# Altium footprint library Package_DFN_QFN.PcbLib: 735 footprints (part 16 of 46)
Each footprint in its own frame and in the unit in brackets; x right, y up, seen from the top. Pads: shape width x height; smd on the part's side, far side on the other; paste and mask are expansions set on the pad; w line width, h text height; cw(c..) or ccw(c..) is an arc to the next point about the centre after c.
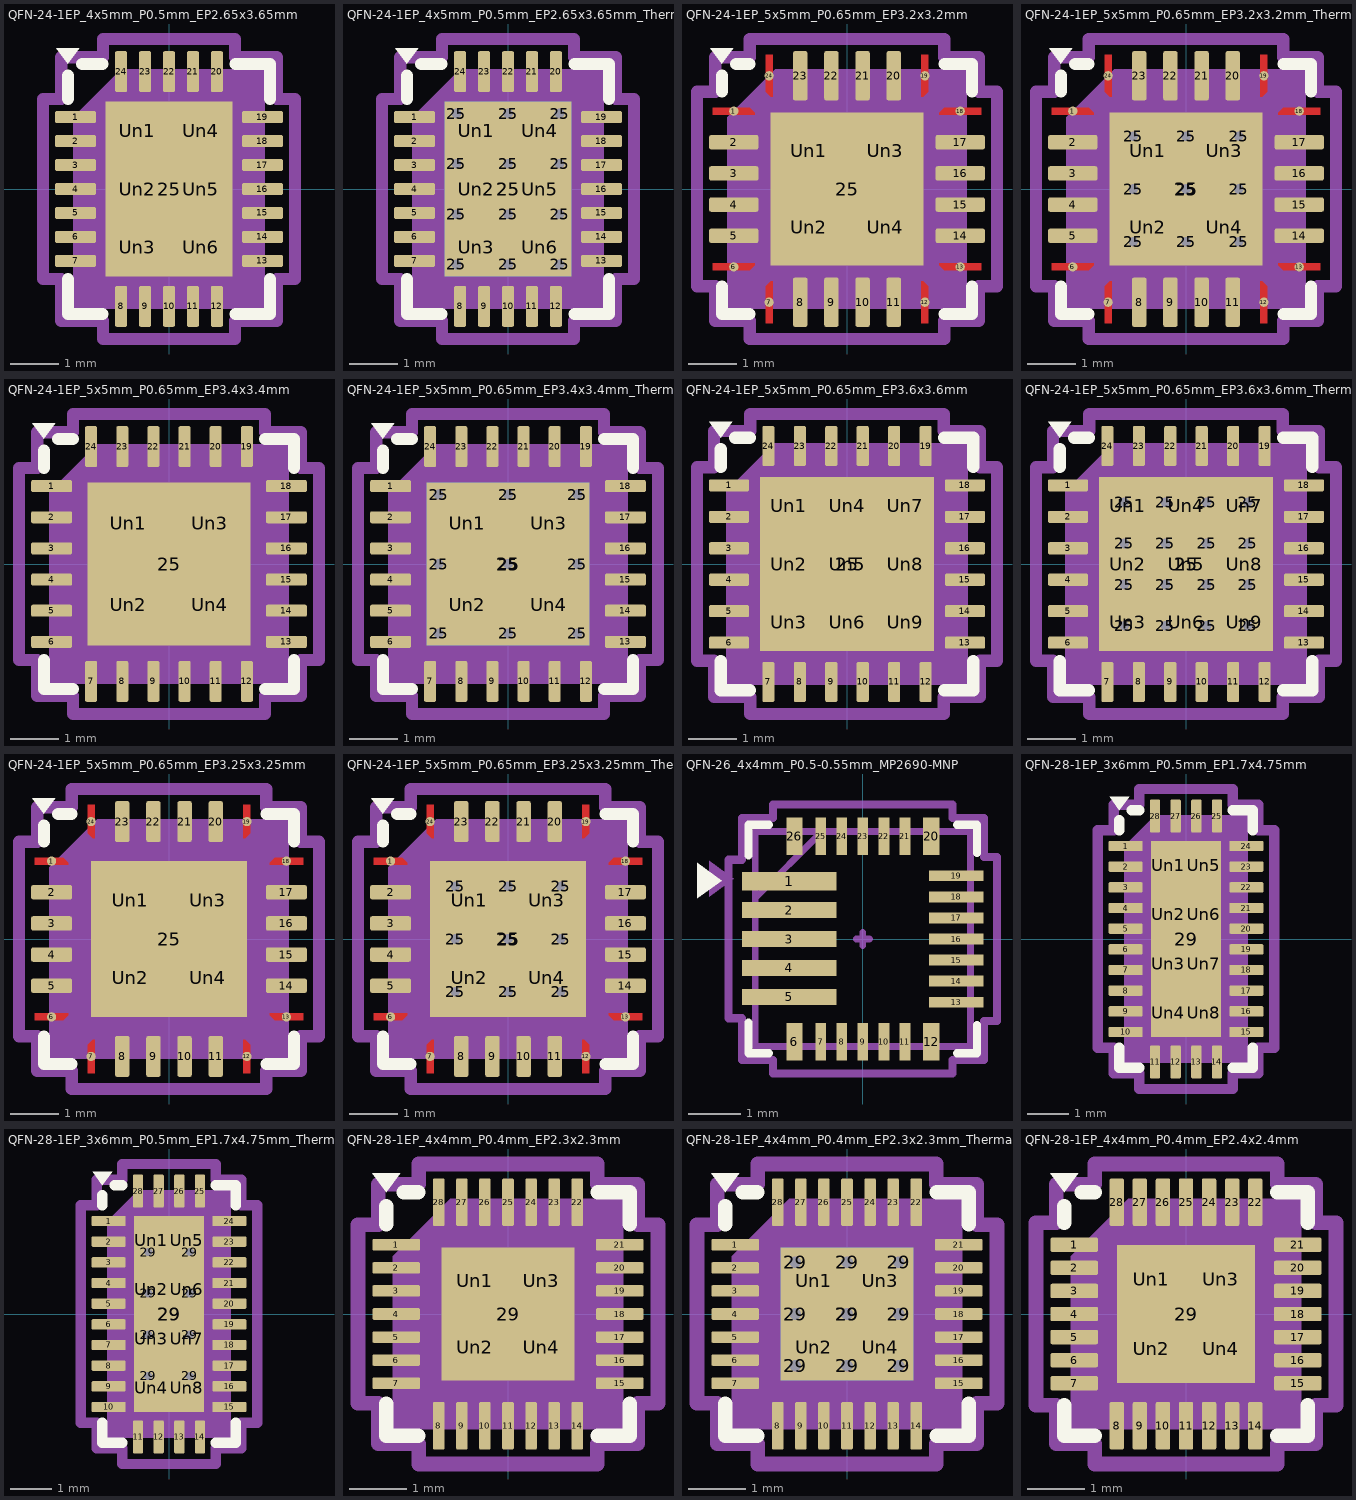
[diagram p15: the footprints below, top view; thin cyan lines are the x and y axes]

## QFN-24-1EP_4x5mm_P0.5mm_EP2.65x3.65mm [mm] "QFN-24-1EP_4x5mm_P0.5mm_EP2.65x3.65mm"
pads (31):
  rrect25% 0.85x0.25 smd: 1(-1.95,1.5) 2(-1.95,1) 3(-1.95,0.5) 4(-1.95,0) 5(-1.95,-0.5) 6(-1.95,-1) 7(-1.95,-1.5) 13(1.95,-1.5) 14(1.95,-1) 15(1.95,-0.5) 16(1.95,0) 17(1.95,0.5) 18(1.95,1) 19(1.95,1.5)
  rrect25% 0.25x0.85 smd: 8(-1,-2.45) 9(-0.5,-2.45) 10(0,-2.45) 11(0.5,-2.45) 12(1,-2.45) 20(1,2.45) 21(0.5,2.45) 22(0,2.45) 23(-0.5,2.45) 24(-1,2.45)
  rect 2.65x3.65 smd: 25(0,0)
  rrect25% 1.07x0.98 on Top Paste: Un1(-0.66,1.22) Un2(-0.66,0) Un3(-0.66,-1.22) Un4(0.66,1.22) Un5(0.66,0) Un6(0.66,-1.22)
F.SilkS:
  region: -2.11,2.61 -2.35,2.94 -1.87,2.94
  lines w0.254: -2.11,-1.885 -2.11,-2.61 -1.385,-2.61 ; -2.11,1.885 -2.11,2.37 ; -1.81,2.61 -1.385,2.61 ; 1.385,-2.61 2.11,-2.61 2.11,-1.885 ; 1.385,2.61 2.11,2.61 2.11,1.885
Top Component Center:
  lines w0.127: -0.127,0 0.127,0 -0.127,0 ; 0,-0.127 0,0.127 0,-0.127
Top Assembly:
  region: 2,-2.5 -2,-2.5 -2,1.5 -1,2.5 2,2.5
Top Courtyard:
  lines w0.254: -2.63,-1.88 -2.25,-1.88 -2.25,-2.75 -1.38,-2.75 -1.38,-3.13 1.38,-3.13 1.38,-2.75 2.25,-2.75 2.25,-1.88 2.63,-1.88 2.63,1.88 2.25,1.88 2.25,2.75 1.38,2.75 1.38,3.13 -1.38,3.13 -1.38,2.75 -2.25,2.75 -2.25,1.88 -2.63,1.88 -2.63,-1.88
Top Designator:
  text ".Designator" at -3.43,-0.344 h1.52
3D body "QFN-24-1EP_4x5mm_P0.5mm_EP2.65x3.65mm.step": height 0.77, standoff 0, extent -2,-2.5 2,2.5

## QFN-24-1EP_4x5mm_P0.5mm_EP2.65x3.65mm_ThermalVias [mm] "QFN-24-1EP_4x5mm_P0.5mm_EP2.65x3.65mm_ThermalVias"
pads (44):
  rrect25% 0.85x0.25 smd: 1(-1.95,1.5) 2(-1.95,1) 3(-1.95,0.5) 4(-1.95,0) 5(-1.95,-0.5) 6(-1.95,-1) 7(-1.95,-1.5) 13(1.95,-1.5) 14(1.95,-1) 15(1.95,-0.5) 16(1.95,0) 17(1.95,0.5) 18(1.95,1) 19(1.95,1.5)
  rrect25% 0.25x0.85 smd: 8(-1,-2.45) 9(-0.5,-2.45) 10(0,-2.45) 11(0.5,-2.45) 12(1,-2.45) 20(1,2.45) 21(0.5,2.45) 22(0,2.45) 23(-0.5,2.45) 24(-1,2.45)
  round 0.5 hole 0.2: 25(-1.075,-1.575) 25(-1.075,-0.525) 25(-1.075,0.525) 25(-1.075,1.575) 25(0,-1.575) 25(0,-0.525) 25(0,0.525) 25(0,1.575) 25(1.075,-1.575) 25(1.075,-0.525) 25(1.075,0.525) 25(1.075,1.575)
  rect 2.65x3.65 smd: 25(0,0)
  rect 2.65x3.65 smd far side: 25(0,0)
  rrect24% 1.15x1.05 on Top Paste: Un1(-0.66,1.22) Un2(-0.66,0) Un3(-0.66,-1.22) Un4(0.66,1.22) Un5(0.66,0) Un6(0.66,-1.22)
F.SilkS:
  region: -2.11,2.61 -2.35,2.94 -1.87,2.94
  lines w0.254: -2.11,-1.885 -2.11,-2.61 -1.385,-2.61 ; -2.11,1.885 -2.11,2.37 ; -1.81,2.61 -1.385,2.61 ; 1.385,-2.61 2.11,-2.61 2.11,-1.885 ; 1.385,2.61 2.11,2.61 2.11,1.885
Top Component Center:
  lines w0.127: -0.127,0 0.127,0 -0.127,0 ; 0,-0.127 0,0.127 0,-0.127
Top Assembly:
  region: 2,-2.5 -2,-2.5 -2,1.5 -1,2.5 2,2.5
Top Courtyard:
  lines w0.254: -2.63,-1.88 -2.25,-1.88 -2.25,-2.75 -1.38,-2.75 -1.38,-3.13 1.38,-3.13 1.38,-2.75 2.25,-2.75 2.25,-1.88 2.63,-1.88 2.63,1.88 2.25,1.88 2.25,2.75 1.38,2.75 1.38,3.13 -1.38,3.13 -1.38,2.75 -2.25,2.75 -2.25,1.88 -2.63,1.88 -2.63,-1.88
Top Designator:
  text ".Designator" at -3.43,-0.344 h1.52
3D body "QFN-24-1EP_4x5mm_P0.5mm_EP2.65x3.65mm.step": height 0.77, standoff 0, extent -2,-2.5 2,2.5

## QFN-24-1EP_5x5mm_P0.65mm_EP3.2x3.2mm [mm] "QFN-24-1EP_5x5mm_P0.65mm_EP3.2x3.2mm"
pads (29):
  round 0.194 smd: 1(-2.362,1.625) 6(-2.362,-1.625) 7(-1.625,-2.362) 12(1.625,-2.362) 13(2.362,-1.625) 18(2.362,1.625) 19(1.625,2.362) 24(-1.625,2.362)
  rrect25% 1.025x0.3 smd: 2(-2.362,0.975) 3(-2.362,0.325) 4(-2.362,-0.325) 5(-2.362,-0.975) 14(2.362,-0.975) 15(2.362,-0.325) 16(2.362,0.325) 17(2.362,0.975)
  rrect25% 0.3x1.025 smd: 8(-0.975,-2.362) 9(-0.325,-2.362) 10(0.325,-2.362) 11(0.975,-2.362) 20(0.975,2.362) 21(0.325,2.362) 22(-0.325,2.362) 23(-0.975,2.362)
  rect 3.2x3.2 smd: 25(0,0)
  rrect19% 1.29x1.29 on Top Paste: Un1(-0.8,0.8) Un2(-0.8,-0.8) Un3(0.8,0.8) Un4(0.8,-0.8)
F.Cu:
  region: -1.55,1.925 -1.594,1.925 -1.7,2.031 -1.7,2.8 -1.55,2.8
  region: 1.7,2.031 1.594,1.925 1.55,1.925 1.55,2.8 1.7,2.8
  region: 2.8,1.55 1.925,1.55 1.925,1.594 2.031,1.7 2.8,1.7
  region: 2.8,-1.7 2.031,-1.7 1.925,-1.594 1.925,-1.55 2.8,-1.55
  region: 1.7,-2.031 1.7,-2.8 1.55,-2.8 1.55,-1.925 1.594,-1.925
  region: -1.55,-2.8 -1.7,-2.8 -1.7,-2.031 -1.594,-1.925 -1.55,-1.925
  region: -1.925,-1.594 -2.031,-1.7 -2.8,-1.7 -2.8,-1.55 -1.925,-1.55
  region: -1.925,1.594 -1.925,1.55 -2.8,1.55 -2.8,1.7 -2.031,1.7
F.SilkS:
  region: -2.61,2.61 -2.85,2.94 -2.37,2.94
  lines w0.254: -2.61,-2.035 -2.61,-2.61 -2.035,-2.61 ; -2.61,2.035 -2.61,2.37 ; -2.31,2.61 -2.035,2.61 ; 2.035,-2.61 2.61,-2.61 2.61,-2.035 ; 2.035,2.61 2.61,2.61 2.61,2.035
F.Paste:
  region: -1.55,1.925 -1.594,1.925 -1.7,2.031 -1.7,2.8 -1.55,2.8
  region: 1.7,2.031 1.594,1.925 1.55,1.925 1.55,2.8 1.7,2.8
  region: 2.8,1.55 1.925,1.55 1.925,1.594 2.031,1.7 2.8,1.7
  region: 2.8,-1.7 2.031,-1.7 1.925,-1.594 1.925,-1.55 2.8,-1.55
  region: 1.7,-2.031 1.7,-2.8 1.55,-2.8 1.55,-1.925 1.594,-1.925
  region: -1.55,-2.8 -1.7,-2.8 -1.7,-2.031 -1.594,-1.925 -1.55,-1.925
  region: -1.925,-1.594 -2.031,-1.7 -2.8,-1.7 -2.8,-1.55 -1.925,-1.55
  region: -1.925,1.594 -1.925,1.55 -2.8,1.55 -2.8,1.7 -2.031,1.7
F.Mask:
  region: -1.55,1.925 -1.594,1.925 -1.7,2.031 -1.7,2.8 -1.55,2.8
  region: 1.7,2.031 1.594,1.925 1.55,1.925 1.55,2.8 1.7,2.8
  region: 2.8,1.55 1.925,1.55 1.925,1.594 2.031,1.7 2.8,1.7
  region: 2.8,-1.7 2.031,-1.7 1.925,-1.594 1.925,-1.55 2.8,-1.55
  region: 1.7,-2.031 1.7,-2.8 1.55,-2.8 1.55,-1.925 1.594,-1.925
  region: -1.55,-2.8 -1.7,-2.8 -1.7,-2.031 -1.594,-1.925 -1.55,-1.925
  region: -1.925,-1.594 -2.031,-1.7 -2.8,-1.7 -2.8,-1.55 -1.925,-1.55
  region: -1.925,1.594 -1.925,1.55 -2.8,1.55 -2.8,1.7 -2.031,1.7
Top Component Center:
  lines w0.127: -0.127,0 0.127,0 -0.127,0 ; 0,-0.127 0,0.127 0,-0.127
Top Assembly:
  region: 2.5,-2.5 -2.5,-2.5 -2.5,1.5 -1.5,2.5 2.5,2.5
Top Courtyard:
  lines w0.254: -3.13,-2.03 -2.75,-2.03 -2.75,-2.75 -2.03,-2.75 -2.03,-3.13 2.03,-3.13 2.03,-2.75 2.75,-2.75 2.75,-2.03 3.13,-2.03 3.13,2.03 2.75,2.03 2.75,2.75 2.03,2.75 2.03,3.13 -2.03,3.13 -2.03,2.75 -2.75,2.75 -2.75,2.03 -3.13,2.03 -3.13,-2.03
Top Designator:
  text ".Designator" at -3.43,-0.344 h1.52
3D body "QFN-24-1EP_5x5mm_P0.65mm_EP3.2x3.2mm.step": height 0.77, standoff 0, extent -2.5,-2.5 2.5,2.5

## QFN-24-1EP_5x5mm_P0.65mm_EP3.2x3.2mm_ThermalVias [mm] "QFN-24-1EP_5x5mm_P0.65mm_EP3.2x3.2mm_ThermalVias"
pads (39):
  round 0.194 smd: 1(-2.362,1.625) 6(-2.362,-1.625) 7(-1.625,-2.362) 12(1.625,-2.362) 13(2.362,-1.625) 18(2.362,1.625) 19(1.625,2.362) 24(-1.625,2.362)
  rrect25% 1.025x0.3 smd: 2(-2.362,0.975) 3(-2.362,0.325) 4(-2.362,-0.325) 5(-2.362,-0.975) 14(2.362,-0.975) 15(2.362,-0.325) 16(2.362,0.325) 17(2.362,0.975)
  rrect25% 0.3x1.025 smd: 8(-0.975,-2.362) 9(-0.325,-2.362) 10(0.325,-2.362) 11(0.975,-2.362) 20(0.975,2.362) 21(0.325,2.362) 22(-0.325,2.362) 23(-0.975,2.362)
  round 0.5 hole 0.2: 25(-1.1,-1.1) 25(-1.1,0) 25(-1.1,1.1) 25(0,-1.1) 25(0,0) 25(0,1.1) 25(1.1,-1.1) 25(1.1,0) 25(1.1,1.1)
  rect 3.2x3.2 smd: 25(0,0)
  rect 2.7x2.7 smd far side: 25(0,0)
  rrect19% 1.29x1.29 on Top Paste: Un1(-0.8,0.8) Un2(-0.8,-0.8) Un3(0.8,0.8) Un4(0.8,-0.8)
F.Cu:
  region: -1.55,1.925 -1.594,1.925 -1.7,2.031 -1.7,2.8 -1.55,2.8
  region: 1.7,2.031 1.594,1.925 1.55,1.925 1.55,2.8 1.7,2.8
  region: 2.8,1.55 1.925,1.55 1.925,1.594 2.031,1.7 2.8,1.7
  region: 2.8,-1.7 2.031,-1.7 1.925,-1.594 1.925,-1.55 2.8,-1.55
  region: 1.7,-2.031 1.7,-2.8 1.55,-2.8 1.55,-1.925 1.594,-1.925
  region: -1.55,-2.8 -1.7,-2.8 -1.7,-2.031 -1.594,-1.925 -1.55,-1.925
  region: -1.925,-1.594 -2.031,-1.7 -2.8,-1.7 -2.8,-1.55 -1.925,-1.55
  region: -1.925,1.594 -1.925,1.55 -2.8,1.55 -2.8,1.7 -2.031,1.7
F.SilkS:
  region: -2.61,2.61 -2.85,2.94 -2.37,2.94
  lines w0.254: -2.61,-2.035 -2.61,-2.61 -2.035,-2.61 ; -2.61,2.035 -2.61,2.37 ; -2.31,2.61 -2.035,2.61 ; 2.035,-2.61 2.61,-2.61 2.61,-2.035 ; 2.035,2.61 2.61,2.61 2.61,2.035
F.Paste:
  region: -1.55,1.925 -1.594,1.925 -1.7,2.031 -1.7,2.8 -1.55,2.8
  region: 1.7,2.031 1.594,1.925 1.55,1.925 1.55,2.8 1.7,2.8
  region: 2.8,1.55 1.925,1.55 1.925,1.594 2.031,1.7 2.8,1.7
  region: 2.8,-1.7 2.031,-1.7 1.925,-1.594 1.925,-1.55 2.8,-1.55
  region: 1.7,-2.031 1.7,-2.8 1.55,-2.8 1.55,-1.925 1.594,-1.925
  region: -1.55,-2.8 -1.7,-2.8 -1.7,-2.031 -1.594,-1.925 -1.55,-1.925
  region: -1.925,-1.594 -2.031,-1.7 -2.8,-1.7 -2.8,-1.55 -1.925,-1.55
  region: -1.925,1.594 -1.925,1.55 -2.8,1.55 -2.8,1.7 -2.031,1.7
F.Mask:
  region: -1.55,1.925 -1.594,1.925 -1.7,2.031 -1.7,2.8 -1.55,2.8
  region: 1.7,2.031 1.594,1.925 1.55,1.925 1.55,2.8 1.7,2.8
  region: 2.8,1.55 1.925,1.55 1.925,1.594 2.031,1.7 2.8,1.7
  region: 2.8,-1.7 2.031,-1.7 1.925,-1.594 1.925,-1.55 2.8,-1.55
  region: 1.7,-2.031 1.7,-2.8 1.55,-2.8 1.55,-1.925 1.594,-1.925
  region: -1.55,-2.8 -1.7,-2.8 -1.7,-2.031 -1.594,-1.925 -1.55,-1.925
  region: -1.925,-1.594 -2.031,-1.7 -2.8,-1.7 -2.8,-1.55 -1.925,-1.55
  region: -1.925,1.594 -1.925,1.55 -2.8,1.55 -2.8,1.7 -2.031,1.7
Top Component Center:
  lines w0.127: -0.127,0 0.127,0 -0.127,0 ; 0,-0.127 0,0.127 0,-0.127
Top Assembly:
  region: 2.5,-2.5 -2.5,-2.5 -2.5,1.5 -1.5,2.5 2.5,2.5
Top Courtyard:
  lines w0.254: -3.13,-2.03 -2.75,-2.03 -2.75,-2.75 -2.03,-2.75 -2.03,-3.13 2.03,-3.13 2.03,-2.75 2.75,-2.75 2.75,-2.03 3.13,-2.03 3.13,2.03 2.75,2.03 2.75,2.75 2.03,2.75 2.03,3.13 -2.03,3.13 -2.03,2.75 -2.75,2.75 -2.75,2.03 -3.13,2.03 -3.13,-2.03
Top Designator:
  text ".Designator" at -3.43,-0.344 h1.52
3D body "QFN-24-1EP_5x5mm_P0.65mm_EP3.2x3.2mm.step": height 0.77, standoff 0, extent -2.5,-2.5 2.5,2.5

## QFN-24-1EP_5x5mm_P0.65mm_EP3.4x3.4mm [mm] "QFN-24-1EP_5x5mm_P0.65mm_EP3.4x3.4mm"
pads (29):
  rrect25% 0.85x0.25 smd: 1(-2.45,1.625) 2(-2.45,0.975) 3(-2.45,0.325) 4(-2.45,-0.325) 5(-2.45,-0.975) 6(-2.45,-1.625) 13(2.45,-1.625) 14(2.45,-0.975) 15(2.45,-0.325) 16(2.45,0.325) 17(2.45,0.975) 18(2.45,1.625)
  rrect25% 0.25x0.85 smd: 7(-1.625,-2.45) 8(-0.975,-2.45) 9(-0.325,-2.45) 10(0.325,-2.45) 11(0.975,-2.45) 12(1.625,-2.45) 19(1.625,2.45) 20(0.975,2.45) 21(0.325,2.45) 22(-0.325,2.45) 23(-0.975,2.45) 24(-1.625,2.45)
  rect 3.4x3.4 smd: 25(0,0)
  rrect18% 1.37x1.37 on Top Paste: Un1(-0.85,0.85) Un2(-0.85,-0.85) Un3(0.85,0.85) Un4(0.85,-0.85)
F.SilkS:
  region: -2.61,2.61 -2.85,2.94 -2.37,2.94
  lines w0.254: -2.61,-2.01 -2.61,-2.61 -2.01,-2.61 ; -2.61,2.01 -2.61,2.37 ; -2.31,2.61 -2.01,2.61 ; 2.01,-2.61 2.61,-2.61 2.61,-2.01 ; 2.01,2.61 2.61,2.61 2.61,2.01
Top Component Center:
  lines w0.127: -0.127,0 0.127,0 -0.127,0 ; 0,-0.127 0,0.127 0,-0.127
Top Assembly:
  region: 2.5,-2.5 -2.5,-2.5 -2.5,1.5 -1.5,2.5 2.5,2.5
Top Courtyard:
  lines w0.254: -3.13,-2 -3.13,2 -2.75,2 -2.75,2.75 -2,2.75 -2,3.13 2,3.13 2,2.75 2.75,2.75 2.75,2 3.13,2 3.13,-2 2.75,-2 2.75,-2.75 2,-2.75 2,-3.13 -2,-3.13 -2,-2.75 -2.75,-2.75 -2.75,-2 -3.13,-2
Top Designator:
  text ".Designator" at -3.43,-0.344 h1.52
3D body "QFN-24-1EP_5x5mm_P0.65mm_EP3.2x3.2mm.step": height 0.77, standoff 0, extent -2.5,-2.5 2.5,2.5

## QFN-24-1EP_5x5mm_P0.65mm_EP3.4x3.4mm_ThermalVias [mm] "QFN-24-1EP_5x5mm_P0.65mm_EP3.4x3.4mm_ThermalVias"
pads (39):
  rrect25% 0.85x0.25 smd: 1(-2.45,1.625) 2(-2.45,0.975) 3(-2.45,0.325) 4(-2.45,-0.325) 5(-2.45,-0.975) 6(-2.45,-1.625) 13(2.45,-1.625) 14(2.45,-0.975) 15(2.45,-0.325) 16(2.45,0.325) 17(2.45,0.975) 18(2.45,1.625)
  rrect25% 0.25x0.85 smd: 7(-1.625,-2.45) 8(-0.975,-2.45) 9(-0.325,-2.45) 10(0.325,-2.45) 11(0.975,-2.45) 12(1.625,-2.45) 19(1.625,2.45) 20(0.975,2.45) 21(0.325,2.45) 22(-0.325,2.45) 23(-0.975,2.45) 24(-1.625,2.45)
  round 0.5 hole 0.2: 25(-1.45,-1.45) 25(-1.45,0) 25(-1.45,1.45) 25(0,-1.45) 25(0,0) 25(0,1.45) 25(1.45,-1.45) 25(1.45,0) 25(1.45,1.45)
  rect 3.4x3.4 smd: 25(0,0)
  rect 3.4x3.4 smd far side: 25(0,0)
  rrect17% 1.47x1.47 on Top Paste: Un1(-0.85,0.85) Un2(-0.85,-0.85) Un3(0.85,0.85) Un4(0.85,-0.85)
F.SilkS:
  region: -2.61,2.61 -2.85,2.94 -2.37,2.94
  lines w0.254: -2.61,-2.01 -2.61,-2.61 -2.01,-2.61 ; -2.61,2.01 -2.61,2.37 ; -2.31,2.61 -2.01,2.61 ; 2.01,-2.61 2.61,-2.61 2.61,-2.01 ; 2.01,2.61 2.61,2.61 2.61,2.01
Top Component Center:
  lines w0.127: -0.127,0 0.127,0 -0.127,0 ; 0,-0.127 0,0.127 0,-0.127
Top Assembly:
  region: 2.5,-2.5 -2.5,-2.5 -2.5,1.5 -1.5,2.5 2.5,2.5
Top Courtyard:
  lines w0.254: -3.13,-2 -2.75,-2 -2.75,-2.75 -2,-2.75 -2,-3.13 2,-3.13 2,-2.75 2.75,-2.75 2.75,-2 3.13,-2 3.13,2 2.75,2 2.75,2.75 2,2.75 2,3.13 -2,3.13 -2,2.75 -2.75,2.75 -2.75,2 -3.13,2 -3.13,-2
Top Designator:
  text ".Designator" at -3.43,-0.344 h1.52
3D body "QFN-24-1EP_5x5mm_P0.65mm_EP3.2x3.2mm.step": height 0.77, standoff 0, extent -2.5,-2.5 2.5,2.5

## QFN-24-1EP_5x5mm_P0.65mm_EP3.6x3.6mm [mm] "QFN-24-1EP_5x5mm_P0.65mm_EP3.6x3.6mm"
pads (34):
  rrect25% 0.825x0.25 smd: 1(-2.438,1.625) 2(-2.438,0.975) 3(-2.438,0.325) 4(-2.438,-0.325) 5(-2.438,-0.975) 6(-2.438,-1.625) 13(2.438,-1.625) 14(2.438,-0.975) 15(2.438,-0.325) 16(2.438,0.325) 17(2.438,0.975) 18(2.438,1.625)
  rrect25% 0.25x0.825 smd: 7(-1.625,-2.438) 8(-0.975,-2.438) 9(-0.325,-2.438) 10(0.325,-2.438) 11(0.975,-2.438) 12(1.625,-2.438) 19(1.625,2.438) 20(0.975,2.438) 21(0.325,2.438) 22(-0.325,2.438) 23(-0.975,2.438) 24(-1.625,2.438)
  rect 3.6x3.6 smd: 25(0,0)
  rrect25% 0.97x0.97 on Top Paste: Un1(-1.2,1.2) Un2(-1.2,0) Un3(-1.2,-1.2) Un4(0,1.2) Un5(0,0) Un6(0,-1.2) Un7(1.2,1.2) Un8(1.2,0) Un9(1.2,-1.2)
F.SilkS:
  region: -2.61,2.61 -2.85,2.94 -2.37,2.94
  lines w0.254: -2.61,-2.01 -2.61,-2.61 -2.01,-2.61 ; -2.61,2.01 -2.61,2.37 ; -2.31,2.61 -2.01,2.61 ; 2.01,-2.61 2.61,-2.61 2.61,-2.01 ; 2.01,2.61 2.61,2.61 2.61,2.01
Top Component Center:
  lines w0.127: -0.127,0 0.127,0 -0.127,0 ; 0,-0.127 0,0.127 0,-0.127
Top Assembly:
  region: 2.5,-2.5 -2.5,-2.5 -2.5,1.5 -1.5,2.5 2.5,2.5
Top Courtyard:
  lines w0.254: -3.1,-2 -2.75,-2 -2.75,-2.75 -2,-2.75 -2,-3.1 2,-3.1 2,-2.75 2.75,-2.75 2.75,-2 3.1,-2 3.1,2 2.75,2 2.75,2.75 2,2.75 2,3.1 -2,3.1 -2,2.75 -2.75,2.75 -2.75,2 -3.1,2 -3.1,-2
Top Designator:
  text ".Designator" at -3.43,-0.344 h1.52
3D body "QFN-24-1EP_5x5mm_P0.65mm_EP3.6x3.6mm.step": height 0.92, standoff 0, extent -2.5,-2.5 2.5,2.5

## QFN-24-1EP_5x5mm_P0.65mm_EP3.6x3.6mm_ThermalVias [mm] "QFN-24-1EP_5x5mm_P0.65mm_EP3.6x3.6mm_ThermalVias"
pads (51):
  rrect25% 0.825x0.25 smd: 1(-2.438,1.625) 2(-2.438,0.975) 3(-2.438,0.325) 4(-2.438,-0.325) 5(-2.438,-0.975) 6(-2.438,-1.625) 13(2.438,-1.625) 14(2.438,-0.975) 15(2.438,-0.325) 16(2.438,0.325) 17(2.438,0.975) 18(2.438,1.625)
  rrect25% 0.25x0.825 smd: 7(-1.625,-2.438) 8(-0.975,-2.438) 9(-0.325,-2.438) 10(0.325,-2.438) 11(0.975,-2.438) 12(1.625,-2.438) 19(1.625,2.438) 20(0.975,2.438) 21(0.325,2.438) 22(-0.325,2.438) 23(-0.975,2.438) 24(-1.625,2.438)
  round 0.5 hole 0.2: 25(-1.275,-1.275) 25(-1.275,-0.425) 25(-1.275,0.425) 25(-1.275,1.275) 25(-0.425,-1.275) 25(-0.425,-0.425) 25(-0.425,0.425) 25(-0.425,1.275) 25(0.425,-1.275) 25(0.425,-0.425) 25(0.425,0.425) 25(0.425,1.275) 25(1.275,-1.275) 25(1.275,-0.425) 25(1.275,0.425) 25(1.275,1.275)
  rect 3.6x3.6 smd: 25(0,0)
  rect 3.05x3.05 smd far side: 25(0,0)
  rrect25% 0.97x0.97 on Top Paste: Un1(-1.2,1.2) Un2(-1.2,0) Un3(-1.2,-1.2) Un4(0,1.2) Un5(0,0) Un6(0,-1.2) Un7(1.2,1.2) Un8(1.2,0) Un9(1.2,-1.2)
F.SilkS:
  region: -2.61,2.61 -2.85,2.94 -2.37,2.94
  lines w0.254: -2.61,-2.01 -2.61,-2.61 -2.01,-2.61 ; -2.61,2.01 -2.61,2.37 ; -2.31,2.61 -2.01,2.61 ; 2.01,-2.61 2.61,-2.61 2.61,-2.01 ; 2.01,2.61 2.61,2.61 2.61,2.01
Top Component Center:
  lines w0.127: -0.127,0 0.127,0 -0.127,0 ; 0,-0.127 0,0.127 0,-0.127
Top Assembly:
  region: 2.5,-2.5 -2.5,-2.5 -2.5,1.5 -1.5,2.5 2.5,2.5
Top Courtyard:
  lines w0.254: -3.1,-2 -2.75,-2 -2.75,-2.75 -2,-2.75 -2,-3.1 2,-3.1 2,-2.75 2.75,-2.75 2.75,-2 3.1,-2 3.1,2 2.75,2 2.75,2.75 2,2.75 2,3.1 -2,3.1 -2,2.75 -2.75,2.75 -2.75,2 -3.1,2 -3.1,-2
Top Designator:
  text ".Designator" at -3.43,-0.344 h1.52
3D body "QFN-24-1EP_5x5mm_P0.65mm_EP3.6x3.6mm.step": height 0.92, standoff 0, extent -2.5,-2.5 2.5,2.5

## QFN-24-1EP_5x5mm_P0.65mm_EP3.25x3.25mm [mm] "QFN-24-1EP_5x5mm_P0.65mm_EP3.25x3.25mm"
pads (29):
  round 0.194 smd: 1(-2.45,1.625) 6(-2.45,-1.625) 7(-1.625,-2.45) 12(1.625,-2.45) 13(2.45,-1.625) 18(2.45,1.625) 19(1.625,2.45) 24(-1.625,2.45)
  rrect25% 0.85x0.3 smd: 2(-2.45,0.975) 3(-2.45,0.325) 4(-2.45,-0.325) 5(-2.45,-0.975) 14(2.45,-0.975) 15(2.45,-0.325) 16(2.45,0.325) 17(2.45,0.975)
  rrect25% 0.3x0.85 smd: 8(-0.975,-2.45) 9(-0.325,-2.45) 10(0.325,-2.45) 11(0.975,-2.45) 20(0.975,2.45) 21(0.325,2.45) 22(-0.325,2.45) 23(-0.975,2.45)
  rect 3.25x3.25 smd: 25(0,0)
  rrect19% 1.31x1.31 on Top Paste: Un1(-0.81,0.81) Un2(-0.81,-0.81) Un3(0.81,0.81) Un4(0.81,-0.81)
F.Cu:
  region: -1.55,2.1 -1.594,2.1 -1.7,2.206 -1.7,2.8 -1.55,2.8
  region: 1.7,2.206 1.594,2.1 1.55,2.1 1.55,2.8 1.7,2.8
  region: 2.8,1.55 2.1,1.55 2.1,1.594 2.206,1.7 2.8,1.7
  region: 2.8,-1.7 2.206,-1.7 2.1,-1.594 2.1,-1.55 2.8,-1.55
  region: 1.7,-2.206 1.7,-2.8 1.55,-2.8 1.55,-2.1 1.594,-2.1
  region: -1.55,-2.8 -1.7,-2.8 -1.7,-2.206 -1.594,-2.1 -1.55,-2.1
  region: -2.1,-1.594 -2.206,-1.7 -2.8,-1.7 -2.8,-1.55 -2.1,-1.55
  region: -2.1,1.594 -2.1,1.55 -2.8,1.55 -2.8,1.7 -2.206,1.7
F.SilkS:
  region: -2.61,2.61 -2.85,2.94 -2.37,2.94
  lines w0.254: -2.61,-2.035 -2.61,-2.61 -2.035,-2.61 ; -2.61,2.035 -2.61,2.37 ; -2.31,2.61 -2.035,2.61 ; 2.035,-2.61 2.61,-2.61 2.61,-2.035 ; 2.035,2.61 2.61,2.61 2.61,2.035
F.Paste:
  region: -1.55,2.1 -1.594,2.1 -1.7,2.206 -1.7,2.8 -1.55,2.8
  region: 1.7,2.206 1.594,2.1 1.55,2.1 1.55,2.8 1.7,2.8
  region: 2.8,1.55 2.1,1.55 2.1,1.594 2.206,1.7 2.8,1.7
  region: 2.8,-1.7 2.206,-1.7 2.1,-1.594 2.1,-1.55 2.8,-1.55
  region: 1.7,-2.206 1.7,-2.8 1.55,-2.8 1.55,-2.1 1.594,-2.1
  region: -1.55,-2.8 -1.7,-2.8 -1.7,-2.206 -1.594,-2.1 -1.55,-2.1
  region: -2.1,-1.594 -2.206,-1.7 -2.8,-1.7 -2.8,-1.55 -2.1,-1.55
  region: -2.1,1.594 -2.1,1.55 -2.8,1.55 -2.8,1.7 -2.206,1.7
F.Mask:
  region: -1.55,2.1 -1.594,2.1 -1.7,2.206 -1.7,2.8 -1.55,2.8
  region: 1.7,2.206 1.594,2.1 1.55,2.1 1.55,2.8 1.7,2.8
  region: 2.8,1.55 2.1,1.55 2.1,1.594 2.206,1.7 2.8,1.7
  region: 2.8,-1.7 2.206,-1.7 2.1,-1.594 2.1,-1.55 2.8,-1.55
  region: 1.7,-2.206 1.7,-2.8 1.55,-2.8 1.55,-2.1 1.594,-2.1
  region: -1.55,-2.8 -1.7,-2.8 -1.7,-2.206 -1.594,-2.1 -1.55,-2.1
  region: -2.1,-1.594 -2.206,-1.7 -2.8,-1.7 -2.8,-1.55 -2.1,-1.55
  region: -2.1,1.594 -2.1,1.55 -2.8,1.55 -2.8,1.7 -2.206,1.7
Top Component Center:
  lines w0.127: -0.127,0 0.127,0 -0.127,0 ; 0,-0.127 0,0.127 0,-0.127
Top Assembly:
  region: 2.5,-2.5 -2.5,-2.5 -2.5,1.5 -1.5,2.5 2.5,2.5
Top Courtyard:
  lines w0.254: -3.13,-2.03 -2.75,-2.03 -2.75,-2.75 -2.03,-2.75 -2.03,-3.13 2.03,-3.13 2.03,-2.75 2.75,-2.75 2.75,-2.03 3.13,-2.03 3.13,2.03 2.75,2.03 2.75,2.75 2.03,2.75 2.03,3.13 -2.03,3.13 -2.03,2.75 -2.75,2.75 -2.75,2.03 -3.13,2.03 -3.13,-2.03
Top Designator:
  text ".Designator" at -3.43,-0.344 h1.52
3D body "QFN-24-1EP_5x5mm_P0.65mm_EP3.2x3.2mm.step": height 0.77, standoff 0, extent -2.5,-2.5 2.5,2.5

## QFN-24-1EP_5x5mm_P0.65mm_EP3.25x3.25mm_ThermalVias [mm] "QFN-24-1EP_5x5mm_P0.65mm_EP3.25x3.25mm_ThermalVias"
pads (39):
  round 0.194 smd: 1(-2.45,1.625) 6(-2.45,-1.625) 7(-1.625,-2.45) 12(1.625,-2.45) 13(2.45,-1.625) 18(2.45,1.625) 19(1.625,2.45) 24(-1.625,2.45)
  rrect25% 0.85x0.3 smd: 2(-2.45,0.975) 3(-2.45,0.325) 4(-2.45,-0.325) 5(-2.45,-0.975) 14(2.45,-0.975) 15(2.45,-0.325) 16(2.45,0.325) 17(2.45,0.975)
  rrect25% 0.3x0.85 smd: 8(-0.975,-2.45) 9(-0.325,-2.45) 10(0.325,-2.45) 11(0.975,-2.45) 20(0.975,2.45) 21(0.325,2.45) 22(-0.325,2.45) 23(-0.975,2.45)
  round 0.5 hole 0.2: 25(-1.1,-1.1) 25(-1.1,0) 25(-1.1,1.1) 25(0,-1.1) 25(0,0) 25(0,1.1) 25(1.1,-1.1) 25(1.1,0) 25(1.1,1.1)
  rect 3.25x3.25 smd: 25(0,0)
  rect 2.7x2.7 smd far side: 25(0,0)
  rrect19% 1.31x1.31 on Top Paste: Un1(-0.81,0.81) Un2(-0.81,-0.81) Un3(0.81,0.81) Un4(0.81,-0.81)
F.Cu:
  region: -1.55,2.1 -1.594,2.1 -1.7,2.206 -1.7,2.8 -1.55,2.8
  region: 1.7,2.206 1.594,2.1 1.55,2.1 1.55,2.8 1.7,2.8
  region: 2.8,1.55 2.1,1.55 2.1,1.594 2.206,1.7 2.8,1.7
  region: 2.8,-1.7 2.206,-1.7 2.1,-1.594 2.1,-1.55 2.8,-1.55
  region: 1.7,-2.206 1.7,-2.8 1.55,-2.8 1.55,-2.1 1.594,-2.1
  region: -1.55,-2.8 -1.7,-2.8 -1.7,-2.206 -1.594,-2.1 -1.55,-2.1
  region: -2.1,-1.594 -2.206,-1.7 -2.8,-1.7 -2.8,-1.55 -2.1,-1.55
  region: -2.1,1.594 -2.1,1.55 -2.8,1.55 -2.8,1.7 -2.206,1.7
F.SilkS:
  region: -2.61,2.61 -2.85,2.94 -2.37,2.94
  lines w0.254: -2.61,-2.035 -2.61,-2.61 -2.035,-2.61 ; -2.61,2.035 -2.61,2.37 ; -2.31,2.61 -2.035,2.61 ; 2.035,-2.61 2.61,-2.61 2.61,-2.035 ; 2.035,2.61 2.61,2.61 2.61,2.035
F.Paste:
  region: -1.55,2.1 -1.594,2.1 -1.7,2.206 -1.7,2.8 -1.55,2.8
  region: 1.7,2.206 1.594,2.1 1.55,2.1 1.55,2.8 1.7,2.8
  region: 2.8,1.55 2.1,1.55 2.1,1.594 2.206,1.7 2.8,1.7
  region: 2.8,-1.7 2.206,-1.7 2.1,-1.594 2.1,-1.55 2.8,-1.55
  region: 1.7,-2.206 1.7,-2.8 1.55,-2.8 1.55,-2.1 1.594,-2.1
  region: -1.55,-2.8 -1.7,-2.8 -1.7,-2.206 -1.594,-2.1 -1.55,-2.1
  region: -2.1,-1.594 -2.206,-1.7 -2.8,-1.7 -2.8,-1.55 -2.1,-1.55
  region: -2.1,1.594 -2.1,1.55 -2.8,1.55 -2.8,1.7 -2.206,1.7
F.Mask:
  region: -1.55,2.1 -1.594,2.1 -1.7,2.206 -1.7,2.8 -1.55,2.8
  region: 1.7,2.206 1.594,2.1 1.55,2.1 1.55,2.8 1.7,2.8
  region: 2.8,1.55 2.1,1.55 2.1,1.594 2.206,1.7 2.8,1.7
  region: 2.8,-1.7 2.206,-1.7 2.1,-1.594 2.1,-1.55 2.8,-1.55
  region: 1.7,-2.206 1.7,-2.8 1.55,-2.8 1.55,-2.1 1.594,-2.1
  region: -1.55,-2.8 -1.7,-2.8 -1.7,-2.206 -1.594,-2.1 -1.55,-2.1
  region: -2.1,-1.594 -2.206,-1.7 -2.8,-1.7 -2.8,-1.55 -2.1,-1.55
  region: -2.1,1.594 -2.1,1.55 -2.8,1.55 -2.8,1.7 -2.206,1.7
Top Component Center:
  lines w0.127: -0.127,0 0.127,0 -0.127,0 ; 0,-0.127 0,0.127 0,-0.127
Top Assembly:
  region: 2.5,-2.5 -2.5,-2.5 -2.5,1.5 -1.5,2.5 2.5,2.5
Top Courtyard:
  lines w0.254: -3.13,-2.03 -2.75,-2.03 -2.75,-2.75 -2.03,-2.75 -2.03,-3.13 2.03,-3.13 2.03,-2.75 2.75,-2.75 2.75,-2.03 3.13,-2.03 3.13,2.03 2.75,2.03 2.75,2.75 2.03,2.75 2.03,3.13 -2.03,3.13 -2.03,2.75 -2.75,2.75 -2.75,2.03 -3.13,2.03 -3.13,-2.03
Top Designator:
  text ".Designator" at -3.43,-0.344 h1.52
3D body "QFN-24-1EP_5x5mm_P0.65mm_EP3.2x3.2mm.step": height 0.77, standoff 0, extent -2.5,-2.5 2.5,2.5

## QFN-26_4x4mm_P0.5-0.55mm_MP2690-MNP [mm]
pads (26):
  rect 1.8x0.35 smd: 1(-1.4,1.1)
  rect 1.803x0.305 smd: 2(-1.4,0.55) 3(-1.4,0) 4(-1.4,-0.55) 5(-1.4,-1.1)
  rect 0.305x0.711 smd: 6(-1.3,-1.95) 12(1.3,-1.95) 20(1.3,1.95) 26(-1.3,1.95)
  rect 0.203x0.711 smd: 7(-0.8,-1.95) 8(-0.4,-1.95) 9(0,-1.95) 10(0.4,-1.95) 11(0.8,-1.95) 21(0.8,1.95) 22(0.4,1.95) 23(0,1.95) 24(-0.4,1.95) 25(-0.8,1.95)
  rect 1.041x0.203 smd: 13(1.775,-1.2) 14(1.775,-0.8) 15(1.775,-0.4) 16(1.775,0) 17(1.775,0.4) 18(1.775,0.8) 19(1.775,1.2)
F.SilkS:
  region: -2.683,1.111 -3.153,0.771 -3.153,1.451
  lines w0.152: -2.172,-1.585 -2.172,-2.172 -1.785,-2.172 ; -2.172,1.585 -2.172,2.172 -1.785,2.172 ; 1.785,-2.172 2.172,-2.172 2.172,-1.634 ; 1.785,2.172 2.172,2.172 2.172,1.634
F.Paste:
  region: -0.735,0.1 -1.805,0.1 -1.805,1.17 -0.735,1.17
  region: -0.735,-1.17 -1.805,-1.17 -1.805,-0.1 -0.735,-0.1
  region: 0.535,0.1 -0.535,0.1 -0.535,1.17 0.535,1.17
  region: 0.535,-1.17 -0.535,-1.17 -0.535,-0.1 0.535,-0.1
  region: 1.805,0.1 0.735,0.1 0.735,1.17 1.805,1.17
  region: 1.805,-1.17 0.735,-1.17 0.735,-0.1 1.805,-0.1
  region: -0.735,0.1 -1.805,0.1 -1.805,1.17 -0.735,1.17
  region: -0.735,-1.17 -1.805,-1.17 -1.805,-0.1 -0.735,-0.1
  region: 0.535,0.1 -0.535,0.1 -0.535,1.17 0.535,1.17
  region: 0.535,-1.17 -0.535,-1.17 -0.535,-0.1 0.535,-0.1
  region: 1.805,0.1 0.735,0.1 0.735,1.17 1.805,1.17
  region: 1.805,-1.17 0.735,-1.17 0.735,-0.1 1.805,-0.1
  region: -0.498,1.102 -0.498,0.948 -2.302,0.948 -2.302,1.252 -0.648,1.252
F.Mask:
  region: -0.498,1.102 -0.498,0.948 -2.302,0.948 -2.302,1.252 -0.648,1.252
Top Component Center:
  lines w0.127: -0.127,0 0.127,0 -0.127,0 ; 0,-0.127 0,0.127 0,-0.127
Top Assembly:
  region: -2.451,1.143 -2.921,0.803 -2.921,1.483
  lines w0.127: -2.045,0.775 -0.775,2.045 ; -2.045,-2.045 2.045,-2.045 2.045,2.045 -2.045,2.045 -2.045,-2.045
Top Courtyard:
  lines w0.152: -2.556,-1.506 -2.556,1.506 -2.299,1.506 -2.299,2.299 -1.706,2.299 -1.706,2.56 1.706,2.56 1.706,2.299 2.299,2.299 2.299,1.556 2.55,1.556 2.55,-1.556 2.299,-1.556 2.299,-2.299 1.706,-2.299 1.706,-2.56 -1.706,-2.56 -1.706,-2.299 -2.299,-2.299 -2.299,-1.506 -2.556,-1.506
Top Designator:
  text ".Designator" at -3.58,-0.344 h1.52
3D body "QFN-26_4x4mm_P0.5-0.55mm_MP2690-MNP.step": height 0.9, standoff 0, extent -2,-2.032 2,1.968

## QFN-28-1EP_3x6mm_P0.5mm_EP1.7x4.75mm [mm] "QFN-28-1EP_3x6mm_P0.5mm_EP1.7x4.75mm"
pads (37):
  rrect25% 0.825x0.25 smd: 1(-1.462,2.25) 2(-1.462,1.75) 3(-1.462,1.25) 4(-1.462,0.75) 5(-1.462,0.25) 6(-1.462,-0.25) 7(-1.462,-0.75) 8(-1.462,-1.25) 9(-1.462,-1.75) 10(-1.462,-2.25) 15(1.462,-2.25) 16(1.462,-1.75) 17(1.462,-1.25) 18(1.462,-0.75) 19(1.462,-0.25) 20(1.462,0.25) 21(1.462,0.75) 22(1.462,1.25) 23(1.462,1.75) 24(1.462,2.25)
  rrect25% 0.25x0.8 smd: 11(-0.75,-2.975) 12(-0.25,-2.975) 13(0.25,-2.975) 14(0.75,-2.975) 25(0.75,2.975) 26(0.25,2.975) 27(-0.25,2.975) 28(-0.75,2.975)
  rect 1.7x4.75 smd: 29(0,0)
  rrect25% 0.69x0.96 on Top Paste: Un1(-0.425,1.785) Un2(-0.425,0.595) Un3(-0.425,-0.595) Un4(-0.425,-1.785) Un5(0.425,1.785) Un6(0.425,0.595) Un7(0.425,-0.595) Un8(0.425,-1.785)
F.SilkS:
  region: -1.61,3.11 -1.85,3.44 -1.37,3.44
  lines w0.254: -1.61,-2.635 -1.61,-3.11 -1.135,-3.11 ; -1.61,2.635 -1.61,2.87 ; -1.31,3.11 -1.135,3.11 ; 1.135,-3.11 1.61,-3.11 1.61,-2.635 ; 1.135,3.11 1.61,3.11 1.61,2.635
Top Component Center:
  lines w0.127: -0.127,0 0.127,0 -0.127,0 ; 0,-0.127 0,0.127 0,-0.127
Top Assembly:
  region: 1.5,-3 -1.5,-3 -1.5,2.25 -0.75,3 1.5,3
Top Courtyard:
  lines w0.254: -2.13,-2.63 -2.13,2.63 -1.75,2.63 -1.75,3.25 -1.13,3.25 -1.13,3.63 1.13,3.63 1.13,3.25 1.75,3.25 1.75,2.63 2.13,2.63 2.13,-2.63 1.75,-2.63 1.75,-3.25 1.13,-3.25 1.13,-3.63 -1.13,-3.63 -1.13,-3.25 -1.75,-3.25 -1.75,-2.63 -2.13,-2.63
Top Designator:
  text ".Designator" at -3.43,-0.344 h1.52
3D body "QFN-28-1EP_3x6mm_P0.5mm_EP1.7x4.75mm.step": height 0.77, standoff 0, extent -1.5,-3 1.5,3

## QFN-28-1EP_3x6mm_P0.5mm_EP1.7x4.75mm_ThermalVias [mm] "QFN-28-1EP_3x6mm_P0.5mm_EP1.7x4.75mm_ThermalVias"
pads (46):
  rrect25% 0.825x0.25 smd: 1(-1.462,2.25) 2(-1.462,1.75) 3(-1.462,1.25) 4(-1.462,0.75) 5(-1.462,0.25) 6(-1.462,-0.25) 7(-1.462,-0.75) 8(-1.462,-1.25) 9(-1.462,-1.75) 10(-1.462,-2.25) 15(1.462,-2.25) 16(1.462,-1.75) 17(1.462,-1.25) 18(1.462,-0.75) 19(1.462,-0.25) 20(1.462,0.25) 21(1.462,0.75) 22(1.462,1.25) 23(1.462,1.75) 24(1.462,2.25)
  rrect25% 0.25x0.8 smd: 11(-0.75,-2.975) 12(-0.25,-2.975) 13(0.25,-2.975) 14(0.75,-2.975) 25(0.75,2.975) 26(0.25,2.975) 27(-0.25,2.975) 28(-0.75,2.975)
  round 0.5 hole 0.2: 29(-0.5,-1.5) 29(-0.5,-0.5) 29(-0.5,0.5) 29(-0.5,1.5) 29(0.5,-1.5) 29(0.5,-0.5) 29(0.5,0.5) 29(0.5,1.5)
  rect 1.7x4.75 smd: 29(0,0)
  rect 1.5x3.5 smd far side: 29(0,0)
  rrect25% 0.69x0.96 on Top Paste: Un1(-0.425,1.785) Un2(-0.425,0.595) Un3(-0.425,-0.595) Un4(-0.425,-1.785) Un5(0.425,1.785) Un6(0.425,0.595) Un7(0.425,-0.595) Un8(0.425,-1.785)
F.SilkS:
  region: -1.61,3.11 -1.85,3.44 -1.37,3.44
  lines w0.254: -1.61,-2.635 -1.61,-3.11 -1.135,-3.11 ; -1.61,2.635 -1.61,2.87 ; -1.31,3.11 -1.135,3.11 ; 1.135,-3.11 1.61,-3.11 1.61,-2.635 ; 1.135,3.11 1.61,3.11 1.61,2.635
Top Component Center:
  lines w0.127: -0.127,0 0.127,0 -0.127,0 ; 0,-0.127 0,0.127 0,-0.127
Top Assembly:
  region: 1.5,-3 -1.5,-3 -1.5,2.25 -0.75,3 1.5,3
Top Courtyard:
  lines w0.254: -2.13,-2.63 -2.13,2.63 -1.75,2.63 -1.75,3.25 -1.13,3.25 -1.13,3.63 1.13,3.63 1.13,3.25 1.75,3.25 1.75,2.63 2.13,2.63 2.13,-2.63 1.75,-2.63 1.75,-3.25 1.13,-3.25 1.13,-3.63 -1.13,-3.63 -1.13,-3.25 -1.75,-3.25 -1.75,-2.63 -2.13,-2.63
Top Designator:
  text ".Designator" at -3.43,-0.344 h1.52
3D body "QFN-28-1EP_3x6mm_P0.5mm_EP1.7x4.75mm.step": height 0.77, standoff 0, extent -1.5,-3 1.5,3

## QFN-28-1EP_4x4mm_P0.4mm_EP2.3x2.3mm [mm] "QFN-28-1EP_4x4mm_P0.4mm_EP2.3x2.3mm"
pads (33):
  rrect25% 0.825x0.2 smd: 1(-1.937,1.2) 2(-1.937,0.8) 3(-1.937,0.4) 4(-1.937,0) 5(-1.937,-0.4) 6(-1.937,-0.8) 7(-1.937,-1.2) 15(1.937,-1.2) 16(1.937,-0.8) 17(1.937,-0.4) 18(1.937,0) 19(1.937,0.4) 20(1.937,0.8) 21(1.937,1.2)
  rrect25% 0.2x0.825 smd: 8(-1.2,-1.937) 9(-0.8,-1.937) 10(-0.4,-1.937) 11(0,-1.937) 12(0.4,-1.937) 13(0.8,-1.937) 14(1.2,-1.937) 22(1.2,1.937) 23(0.8,1.937) 24(0.4,1.937) 25(0,1.937) 26(-0.4,1.937) 27(-0.8,1.937) 28(-1.2,1.937)
  rect 2.3x2.3 smd: 29(0,0)
  rrect25% 0.93x0.93 on Top Paste: Un1(-0.575,0.575) Un2(-0.575,-0.575) Un3(0.575,0.575) Un4(0.575,-0.575)
F.SilkS:
  region: -2.11,2.11 -2.35,2.44 -1.87,2.44
  lines w0.254: -2.11,-1.56 -2.11,-2.11 -1.56,-2.11 ; -2.11,1.56 -2.11,1.87 ; -1.81,2.11 -1.56,2.11 ; 1.56,-2.11 2.11,-2.11 2.11,-1.56 ; 1.56,2.11 2.11,2.11 2.11,1.56
Top Component Center:
  lines w0.127: -0.127,0 0.127,0 -0.127,0 ; 0,-0.127 0,0.127 0,-0.127
Top Assembly:
  region: 2,-2 -2,-2 -2,1 -1,2 2,2
Top Courtyard:
  lines w0.254: -2.6,-1.55 -2.6,1.55 -2.25,1.55 -2.25,2.25 -1.55,2.25 -1.55,2.6 1.55,2.6 1.55,2.25 2.25,2.25 2.25,1.55 2.6,1.55 2.6,-1.55 2.25,-1.55 2.25,-2.25 1.55,-2.25 1.55,-2.6 -1.55,-2.6 -1.55,-2.25 -2.25,-2.25 -2.25,-1.55 -2.6,-1.55
Top Designator:
  text ".Designator" at -3.43,-0.344 h1.52
3D body "QFN-28-1EP_4x4mm_P0.4mm_EP2.4x2.4mm.step": height 0.77, standoff 0, extent -2,-2 2,2

## QFN-28-1EP_4x4mm_P0.4mm_EP2.3x2.3mm_ThermalVias [mm] "QFN-28-1EP_4x4mm_P0.4mm_EP2.3x2.3mm_ThermalVias"
pads (43):
  rrect25% 0.825x0.2 smd: 1(-1.937,1.2) 2(-1.937,0.8) 3(-1.937,0.4) 4(-1.937,0) 5(-1.937,-0.4) 6(-1.937,-0.8) 7(-1.937,-1.2) 15(1.937,-1.2) 16(1.937,-0.8) 17(1.937,-0.4) 18(1.937,0) 19(1.937,0.4) 20(1.937,0.8) 21(1.937,1.2)
  rrect25% 0.2x0.825 smd: 8(-1.2,-1.937) 9(-0.8,-1.937) 10(-0.4,-1.937) 11(0,-1.937) 12(0.4,-1.937) 13(0.8,-1.937) 14(1.2,-1.937) 22(1.2,1.937) 23(0.8,1.937) 24(0.4,1.937) 25(0,1.937) 26(-0.4,1.937) 27(-0.8,1.937) 28(-1.2,1.937)
  round 0.5 hole 0.2: 29(-0.9,-0.9) 29(-0.9,0) 29(-0.9,0.9) 29(0,-0.9) 29(0,0) 29(0,0.9) 29(0.9,-0.9) 29(0.9,0) 29(0.9,0.9)
  rect 2.3x2.3 smd: 29(0,0)
  rect 2.3x2.3 smd far side: 29(0,0)
  rrect25% 1x1 on Top Paste: Un1(-0.575,0.575) Un2(-0.575,-0.575) Un3(0.575,0.575) Un4(0.575,-0.575)
F.SilkS:
  region: -2.11,2.11 -2.35,2.44 -1.87,2.44
  lines w0.254: -2.11,-1.56 -2.11,-2.11 -1.56,-2.11 ; -2.11,1.56 -2.11,1.87 ; -1.81,2.11 -1.56,2.11 ; 1.56,-2.11 2.11,-2.11 2.11,-1.56 ; 1.56,2.11 2.11,2.11 2.11,1.56
Top Component Center:
  lines w0.127: -0.127,0 0.127,0 -0.127,0 ; 0,-0.127 0,0.127 0,-0.127
Top Assembly:
  region: 2,-2 -2,-2 -2,1 -1,2 2,2
Top Courtyard:
  lines w0.254: -2.6,-1.55 -2.25,-1.55 -2.25,-2.25 -1.55,-2.25 -1.55,-2.6 1.55,-2.6 1.55,-2.25 2.25,-2.25 2.25,-1.55 2.6,-1.55 2.6,1.55 2.25,1.55 2.25,2.25 1.55,2.25 1.55,2.6 -1.55,2.6 -1.55,2.25 -2.25,2.25 -2.25,1.55 -2.6,1.55 -2.6,-1.55
Top Designator:
  text ".Designator" at -3.43,-0.344 h1.52
3D body "QFN-28-1EP_4x4mm_P0.4mm_EP2.4x2.4mm.step": height 0.77, standoff 0, extent -2,-2 2,2
3D body "QFN-28-1EP_4x4mm_P0.4mm_EP2.4x2.4mm.step": height 0.77, standoff 0, extent -2,-2 2,2

## QFN-28-1EP_4x4mm_P0.4mm_EP2.4x2.4mm [mm] "QFN-28-1EP_4x4mm_P0.4mm_EP2.4x2.4mm"
pads (33):
  rrect25% 0.825x0.25 smd: 1(-1.937,1.2) 2(-1.937,0.8) 3(-1.937,0.4) 4(-1.937,0) 5(-1.937,-0.4) 6(-1.937,-0.8) 7(-1.937,-1.2) 15(1.937,-1.2) 16(1.937,-0.8) 17(1.937,-0.4) 18(1.937,0) 19(1.937,0.4) 20(1.937,0.8) 21(1.937,1.2)
  rrect25% 0.25x0.825 smd: 8(-1.2,-1.937) 9(-0.8,-1.937) 10(-0.4,-1.937) 11(0,-1.937) 12(0.4,-1.937) 13(0.8,-1.937) 14(1.2,-1.937) 22(1.2,1.937) 23(0.8,1.937) 24(0.4,1.937) 25(0,1.937) 26(-0.4,1.937) 27(-0.8,1.937) 28(-1.2,1.937)
  rect 2.4x2.4 smd: 29(0,0)
  rrect25% 0.97x0.97 on Top Paste: Un1(-0.6,0.6) Un2(-0.6,-0.6) Un3(0.6,0.6) Un4(0.6,-0.6)
F.SilkS:
  region: -2.11,2.11 -2.35,2.44 -1.87,2.44
  lines w0.254: -2.11,-1.585 -2.11,-2.11 -1.585,-2.11 ; -2.11,1.585 -2.11,1.87 ; -1.81,2.11 -1.585,2.11 ; 1.585,-2.11 2.11,-2.11 2.11,-1.585 ; 1.585,2.11 2.11,2.11 2.11,1.585
Top Component Center:
  lines w0.127: -0.127,0 0.127,0 -0.127,0 ; 0,-0.127 0,0.127 0,-0.127
Top Assembly:
  region: 2,-2 -2,-2 -2,1 -1,2 2,2
Top Courtyard:
  lines w0.254: -2.6,-1.58 -2.25,-1.58 -2.25,-2.25 -1.58,-2.25 -1.58,-2.6 1.58,-2.6 1.58,-2.25 2.25,-2.25 2.25,-1.58 2.6,-1.58 2.6,1.58 2.25,1.58 2.25,2.25 1.58,2.25 1.58,2.6 -1.58,2.6 -1.58,2.25 -2.25,2.25 -2.25,1.58 -2.6,1.58 -2.6,-1.58
Top Designator:
  text ".Designator" at -3.43,-0.344 h1.52
3D body "QFN-28-1EP_4x4mm_P0.4mm_EP2.4x2.4mm.step": height 0.77, standoff 0, extent -2,-2 2,2